# Altium footprint library Footprint-Lib-PhilsLab.PcbLib: 544 footprints (part 18 of 34)
Each footprint in its own frame and in the unit in brackets; x right, y up, seen from the top. Pads: shape width x height; smd on the part's side, far side on the other; paste and mask are expansions set on the pad; w line width, h text height; cw(c..) or ccw(c..) is an arc to the next point about the centre after c.
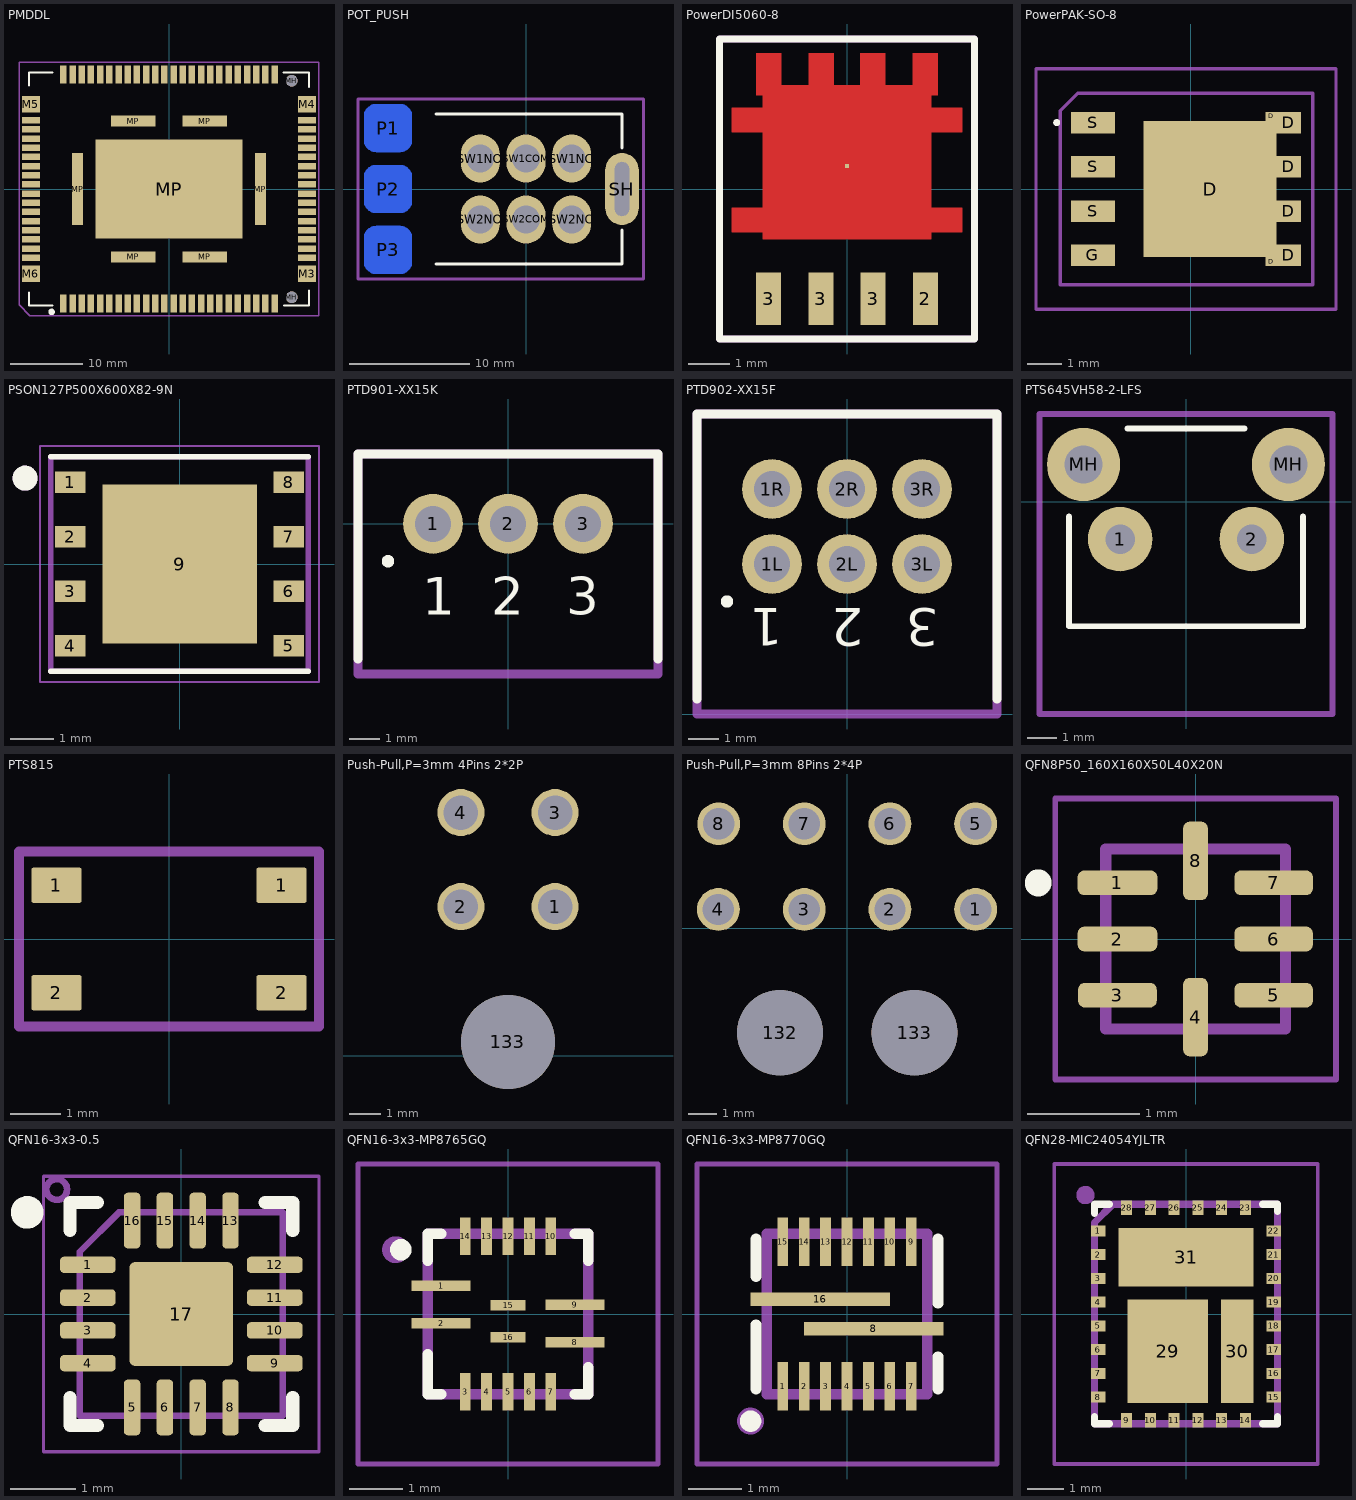
[diagram p17: the footprints below, top view; thin cyan lines are the x and y axes]

## PMDDL [mm]
pads (93):
  rect 0.9x2.5 smd: 1(-14.605,-15.85) 2(-13.335,-15.85) 3(-12.065,-15.85) 4(-10.795,-15.85) 5(-9.525,-15.85) 6(-8.255,-15.85) 7(-6.985,-15.85) 8(-5.715,-15.85) 9(-4.445,-15.85) 10(-3.175,-15.85) 11(-1.905,-15.85) 12(-0.635,-15.85) 13(0.635,-15.85) 14(1.905,-15.85) 15(3.175,-15.85) 16(4.445,-15.85) 17(5.715,-15.85) 18(6.985,-15.85) 19(8.255,-15.85) 20(9.525,-15.85) 21(10.795,-15.85) 22(12.065,-15.85) 23(13.335,-15.85) 24(14.605,-15.85) 41(14.605,15.85) 42(13.335,15.85) 43(12.065,15.85) 44(10.795,15.85) 45(9.525,15.85) 46(8.255,15.85) 47(6.985,15.85) 48(5.715,15.85) 49(4.445,15.85) 50(3.175,15.85) 51(1.905,15.85) 52(0.635,15.85) 53(-0.635,15.85) 54(-1.905,15.85) 55(-3.175,15.85) 56(-4.445,15.85) 57(-5.715,15.85) 58(-6.985,15.85) 59(-8.255,15.85) 60(-9.525,15.85) 61(-10.795,15.85) 62(-12.065,15.85) 63(-13.335,15.85) 64(-14.605,15.85)
  rect 2.5x0.9 smd: 25(19.1,-9.525) 26(19.1,-8.255) 27(19.1,-6.985) 28(19.1,-5.715) 29(19.1,-4.445) 30(19.1,-3.175) 31(19.1,-1.905) 32(19.1,-0.635) 33(19.1,0.635) 34(19.1,1.905) 35(19.1,3.175) 36(19.1,4.445) 37(19.1,5.715) 38(19.1,6.985) 39(19.1,8.255) 40(19.1,9.525) 65(-19.1,9.525) 66(-19.1,8.255) 67(-19.1,6.985) 68(-19.1,5.715) 69(-19.1,4.445) 70(-19.1,3.175) 71(-19.1,1.905) 72(-19.1,0.635) 73(-19.1,-0.635) 74(-19.1,-1.905) 75(-19.1,-3.175) 76(-19.1,-4.445) 77(-19.1,-5.715) 78(-19.1,-6.985) 79(-19.1,-8.255) 80(-19.1,-9.525)
  rect 2.5x2.3 smd: M3(19.1,-11.7) M4(19.1,11.7) M5(-19.1,11.7) M6(-19.1,-11.7)
  round 1.6 / inner round 1.4 / far side round 1.6 hole 1.6 unplated: MH(16.97,-14.985) MH(16.97,14.985)
  rect 1.5x10 smd: MP(-12.65,0) MP(12.65,0)
  rect 6.15x1.5 smd: MP(-4.975,-9.4) MP(-4.975,9.4) MP(4.975,-9.4) MP(4.975,9.4)
  rect 20.32x13.716 smd: MP(0,0)
Top Overlay:
  circle w0.5: c-16.25,-17 r0.2
  lines w0.25: -19.35,-14.31 -19.35,-16.1 -16.125,-16.1 ; -19.35,14.326 -19.35,16.1 -16.125,16.1 ; 15.805,16.1 19.355,16.1 19.355,14.07 ; 15.89,-16.1 19.35,-16.1 19.35,-14.045
Mechanical 13:
  lines w0.2: -20.75,-16 -19.25,-17.5 20.75,-17.5 20.75,17.5 -20.75,17.5 -20.75,-16
  text "'.Designator'" at -5.665,-0.417 h1
3D body "socket.stp": height 6.02, standoff -1.1, extent -19.456,-16.341 19.644,16.239
3D body "pDDL-Microhard.step": height 5.94, standoff 2.34, extent -16.406,-13.385 16.614,13.285

## POT_PUSH [mm]
pads (10):
  rrect50% 4x4 smd far side: P1(-11.5,5.08) P2(-11.5,0) P3(-11.5,-5.08)
  oval 2.8x6 hole 1.2 slot 4.5 at 90 deg: SH(8,0)
  oval 3.25x4 hole 2.3: SW1COM(0,2.54) SW1NC(3.81,2.54) SW1NO(-3.81,2.54) SW2COM(0,-2.54) SW2NC(3.81,-2.54) SW2NO(-3.81,-2.54)
Top Overlay:
  lines w0.254: -7.5,-6.25 8,-6.25 8,-3.4 ; -7.5,6.25 8,6.25 8,3.4
Mechanical 13:
  lines w0.254: -14,-7.5 9.8,-7.5 9.8,7.5 -14,7.5 -14,0.35 -14,-7.5
  text "'.Designator'" at -9.097,-0.375 h1.5
3D body "Potentiometer_push_pull.STEP": height 20.52, standoff -3.82, extent -38.199,-8.89 8.283,8.89

## PowerDI5060-8 [mm]
pads (5):
  rect 0.1x0.1 smd paste-0.1 mask-0.1: 1(0,0.56)
  rect 0.61x1.27 smd: 2(1.905,-2.66) 3(-1.905,-2.66) 3(-0.635,-2.66) 3(0.635,-2.66)
Top Layer:
  region: -2.8,-1.045 -2.05,-1.045 -2.05,-1.22 2.05,-1.22 2.05,-1.045 2.8,-1.045 2.8,-0.445 2.05,-0.445 2.05,1.38 2.8,1.38 2.8,1.98 2.05,1.98 2.05,2.28 2.2,2.28 2.2,3.305 1.6,3.305 1.6,2.53 0.925,2.53 0.925,3.305 0.325,3.305 0.325,2.53 -0.325,2.53 -0.325,3.305 -0.925,3.305 -0.925,2.53 -1.6,2.53 -1.6,3.305 -2.2,3.305 -2.2,2.28 -2.05,2.28 -2.05,1.98 -2.8,1.98 -2.8,1.38 -2.05,1.38 -2.05,-0.445 -2.8,-0.445
Top Overlay:
  lines w0.175: -3.1,-3.64 -3.1,3.65 3.1,3.65 3.1,-3.64 -3.1,-3.64
Mechanical 13:
  lines w0.175: -3.1,-3.64 -3.1,3.65 3.1,3.65 3.1,-3.64 -3.1,-3.64
  text "'.Designator'" at -4.532,-0.333 h0.8
  text "D" at -0.267,1.65 h0.8
  text "S" at -2.167,-3.025 h0.8
  text "S" at -0.892,-3.025 h0.8
  text "S" at 0.358,-3.025 h0.8
  text "G" at 1.633,-3.025 h0.8
3D body "PowerDI5060-8.stp": height 1, standoff 0.01, extent -2.575,-3.09 2.575,3.06

## PowerPAK-SO-8 [mm]
pads (11):
  rect 3.81x3.91 smd: D(0.55,0)
  rect 0.31x0.255 smd: D(2.3,-2.083) D(2.3,2.083)
  rect 0.71x0.61 smd: D(2.81,-1.905) D(2.81,-0.635) D(2.81,0.635) D(2.81,1.905)
  rect 1.27x0.61 smd: G(-2.81,-1.905) S(-2.81,-0.635) S(-2.81,0.635) S(-2.81,1.905)
Top Overlay:
  lines w0.1: -3.9,1.905 ccw(c-3.85,1.905) -3.8,1.905 ccw(c-3.85,1.905) -3.9,1.905
Mechanical 13:
  lines w0.1: -3.75,-2.75 -3.75,2.25 -3.25,2.75 3.5,2.75 3.5,-2.75 -3.75,-2.75
  text "'.Designator'" at -5.84,-0.925 h1
Mechanical 15:
  lines w0.1: -4.445,-3.45 -4.445,3.45 4.165,3.45 4.165,-3.45 -4.445,-3.45
3D body "SIR500DP-T1-RE3.stp": height 1.27, standoff 0, extent -3.384,-2.45 3.104,2.45

## PSON127P500X600X82-9N [mm]
pads (9):
  rect 0.71x0.51 smd: 1(-2.55,1.905) 2(-2.55,0.635) 3(-2.55,-0.635) 4(-2.55,-1.905) 5(2.55,-1.905) 6(2.55,-0.635) 7(2.55,0.635) 8(2.55,1.905)
  rect 3.6x3.7 smd paste-3: 9(0,0)
Top Overlay:
  circle w0.3: c-3.6,2 r0.141
  lines w0.127: -3,-2.5 3,-2.5 ; -3,2.5 3,2.5
Top Paste:
  region: 1.5,-1.45 0.18,-1.45 0.18,-0.18 1.5,-0.18
  region: -0.18,-1.45 -1.5,-1.45 -1.5,-0.18 -0.18,-0.18
  region: 1.5,0.18 0.18,0.18 0.18,1.45 1.5,1.45
  region: -0.18,0.18 -1.5,0.18 -1.5,1.45 -0.18,1.45
Mechanical 13:
  circle w0.3: c-3.6,2 r0.141
  lines w0.127: -3,-2.5 -3,2.5 3,2.5 3,-2.5 -3,-2.5
Mechanical 15:
  lines w0.05: -3.25,-2.75 -3.25,2.75 3.25,2.75 3.25,-2.75 -3.25,-2.75

## PTD901-XX15K [mm]
pads (3):
  round 2 hole 1.2 mask+0.07: 1(-2.5,0) 2(0,0) 3(2.5,0)
Top Overlay:
  circle w0.25: c-4,-1.25 r0.083
  lines w0.3: -5,-4.5 -5,2.318 5,2.318 5,-4.5
  text "3" at 1.933,-3.025 h1.25
  text "2" at -0.567,-3.025 h1.25
  text "1" at -2.858,-3.025 h1.25
Mechanical 13:
  lines w0.3: -5,-5 5,-5 5,2.318 -5,2.318 -5,-5
  text "'.Designator'" at -7.231,-2.837 h1.25
3D body "PTD901.step": height 11.32, standoff -3.49, extent -4.75,-20 4.75,2.061

## PTD902-XX15F [mm]
pads (6):
  round 2 hole 1.2 mask+0.07: 1L(-2.5,5) 1R(-2.5,7.5) 2L(0,5) 2R(0,7.5) 3L(2.5,5) 3R(2.5,7.5)
Top Overlay:
  circle w0.25: c-4,3.75 r0.083
  lines w0.3: -5,0.5 -5,10 5,10 5,0.5
  text "1" at -2.142,3.525 h1.25
  text "2" at 0.567,3.525 h1.25
  text "3" at 3.067,3.525 h1.25
Mechanical 13:
  lines w0.3: -5,0 -5,10 5,10 5,0 -5,0
  text "'.Designator'" at -7.231,-1.087 h1.25
3D body "ptd902-xx15f-xxxx.stp": height 11.36, standoff -3.49, extent -4.8,-15 4.8,9.65

## PTS645VH58-2-LFS [mm]
pads (4):
  round 2.2 hole 1: 1(-2.25,-1.275) 2(2.25,-1.275)
  round 2.5 hole 1.3: MH(-3.5,1.275) MH(3.5,1.275)
Top Overlay:
  lines w0.2: -4,-0.5 -4,-4.25 4,-4.25 4,-0.5 ; -2,2.5 2,2.5
Mechanical 13:
  lines w0.2: -5,-7.25 -5,3 0,3 5,3 5,-7.25 -4.75,-7.25 -5,-7.25
  text ".Designator" at -4.998,-0.333 h1
3D body "PTS645VH58-2LFS.stp": height 7.42, standoff -3.93, extent -4.251,-7.075 4.253,2.925

## PTS815 [mm]
pads (4):
  rrect10% 1x0.7 smd mask+0: 1(-2.25,1.075) 1(2.25,1.075) 2(-2.25,-1.075) 2(2.25,-1.075)
Mechanical 13:
  lines w0.2: -3,-1.75 3,-1.75 3,1.75 -3,1.75 -3,-1.75
  text "'.Designator'" at -5.84,-0.925 h1
3D body "PTS815SJM250SMTRLFS.stp": height 2.5, standoff 0, extent -2.25,-1.6 2.25,1.6

## Push-Pull,P=3mm 4Pins 2*2P [mm]
pads (5):
  round 1.5 hole 1.1: 1(9.17,4.76) 2(6.17,4.76) 3(9.17,7.76) 4(6.17,7.76)
  round 3 hole 3: 133(7.67,0.44)
3D body "430450402.stp": height 4.83, standoff -7.12, extent 2.87,-2.05 13.02,10.19

## Push-Pull,P=3mm 8Pins 2*4P [mm]
pads (10):
  round 1.5 hole 1.1: 1(4.505,0.66) 2(1.505,0.66) 3(-1.495,0.66) 4(-4.505,0.66) 5(4.505,3.66) 6(1.505,3.66) 7(-1.495,3.66) 8(-4.495,3.66)
  round 3 hole 3: 132(-2.345,-3.66) 133(2.365,-3.66)
3D body "430450802.stp": height 4.83, standoff -7.12, extent -7.975,-6.76 8.175,5.48

## QFN8P50_160X160X50L40X20N [mm]
pads (8):
  rrect54% 0.71x0.22 smd: 1(-0.695,0.5) 2(-0.695,0)
  rrect54% 0.7x0.22 smd: 3(-0.695,-0.5) 5(0.695,-0.5) 6(0.695,0) 7(0.695,0.5)
  rrect54% 0.22x0.7 smd: 4(0,-0.695) 8(0,0.695)
Top Overlay:
  circle w0.2: c-1.4,0.5 r0.02
Mechanical 13:
  lines w0.1: -0.8,-0.8 -0.8,0.8 0.8,0.8 0.8,-0.8 -0.8,-0.8
Mechanical 15:
  lines w0.05: -1.25,-1.25 -1.25,1.25 1.25,1.25 1.25,-1.25 -1.25,-1.25

## QFN16-3x3-0.5 [mm] "QFN, 16-Leads, Body 3.00x3.00mm, Pitch 0.50mm, Thermal Pad 1.58x1.58mm, IPC Medium Density"
height 1
pads (17):
  rrect50% 0.85x0.25 smd mask+0.05: 1(-1.425,0.75) 2(-1.425,0.25) 3(-1.425,-0.25) 4(-1.425,-0.75) 9(1.425,-0.75) 10(1.425,-0.25) 11(1.425,0.25) 12(1.425,0.75)
  rrect50% 0.25x0.85 smd mask+0.05: 5(-0.75,-1.425) 6(-0.25,-1.425) 7(0.25,-1.425) 8(0.75,-1.425) 13(0.75,1.425) 14(0.25,1.425) 15(-0.25,1.425) 16(-0.75,1.425)
  rrect10% 1.58x1.58 smd mask+0.05: 17(0,0)
Top Overlay:
  circle w0.25: c-2.35,1.55 r0.125
  lines w0.2: -1.7,-1.275 -1.7,-1.7 -1.275,-1.7 ; -1.7,1.275 -1.7,1.7 -1.275,1.7 ; 1.275,-1.7 1.7,-1.7 1.7,-1.275 ; 1.275,1.7 1.7,1.7 1.7,1.275
Mechanical 13:
  circle w0.1: c-1.9,1.9 r0.158
  lines w0.1: -1.55,-1.55 -1.55,0.95 -0.95,1.55 1.55,1.55 1.55,-1.55 -1.55,-1.55
  text "'.Designator'" at -6.315,-1.4 h1
Mechanical 15:
  lines w0.05: -2.1,-2.1 2.1,-2.1 2.1,2.1 -2.1,2.1 -2.1,-2.1
  lines w0.1: -0.5,0 0.5,0 ; 0,-0.5 0,0.5
3D body "QFN16-3x3-0.5.step": height 1, standoff 0, extent -1.551,-1.551 1.551,1.551

## QFN16-3x3-MP8765GQ [mm]
pads (16):
  rect 1.1x0.2 smd: 1(-1.25,0.525) 2(-1.25,-0.175) 8(1.25,-0.525) 9(1.25,0.175)
  rect 0.2x0.7 smd: 3(-0.8,-1.45) 4(-0.4,-1.45) 5(0,-1.45) 6(0.4,-1.45) 7(0.8,-1.45) 10(0.8,1.45) 11(0.4,1.45) 12(0,1.45) 13(-0.4,1.45) 14(-0.8,1.45)
  rect 0.65x0.2 smd: 15(0,0.165) 16(0,-0.435)
Top Overlay:
  lines w0.2: -1.5,-0.75 -1.5,-1.5 -1.25,-1.5 ; -1.5,1 -1.5,1.5 -1.25,1.5 ; 1.25,-1.5 1.5,-1.5 1.5,-1 ; 1.25,1.5 1.5,1.5 1.5,1 ; -2.1,1.2 ccw(c-2,1.2) -1.9,1.2 ccw(c-2,1.2) -2.1,1.2
Mechanical 13:
  circle w0.3: c-2.1,1.2 r0.1
  lines w0.2: -1.5,-1.5 -1.5,1.5 1.5,1.5 1.5,-1.5 -1.5,-1.5
  text "'.Designator'" at -5.815,-0.9 h1
Mechanical 15:
  lines w0.1: -2.8,-2.8 -2.8,2.8 2.8,2.8 2.8,-2.8 -2.8,-2.8
3D body "MP8765GQ-Z.stp": height 1.1, standoff 0, extent -1.5,-1.5 1.5,1.5

## QFN16-3x3-MP8770GQ [mm]
pads (16):
  rect 0.2x0.9 smd: 1(-1.2,-1.35) 2(-0.8,-1.35) 3(-0.4,-1.35) 4(0,-1.35) 5(0.4,-1.35) 6(0.8,-1.35) 7(1.2,-1.35) 9(1.2,1.35) 10(0.8,1.35) 11(0.4,1.35) 12(0,1.35) 13(-0.4,1.35) 14(-0.8,1.35) 15(-1.2,1.35)
  rect 2.6x0.25 smd: 8(0.5,-0.275) 16(-0.5,0.275)
Top Overlay:
  lines w0.2: -1.7,-1.4 -1.7,-0.2 ; -1.7,0.7 -1.7,1.4 ; 1.7,-1.4 1.7,-0.8 ; 1.7,0.2 1.7,1.4 ; -1.9,-2 ccw(c-1.8,-2) -1.7,-2 ccw(c-1.8,-2) -1.9,-2
Mechanical 13:
  circle w0.3: c-1.801,-1.998 r0.1
  lines w0.2: -1.5,-1.5 -1.5,1.5 1.5,1.5 1.5,-1.5 -1.5,-1.5
  text "'.Designator'" at -5.815,-0.9 h1
Mechanical 15:
  lines w0.1: -2.8,-2.8 -2.8,2.8 2.8,2.8 2.8,-2.8 -2.8,-2.8
3D body "MP8770CGQ.step": height 0.86, standoff 0.01, extent -1.5,-1.5 1.5,1.5

## QFN28-MIC24054YJLTR [mm]
pads (31):
  rect 0.4x0.3 smd: 1(-2.4,2.275) 2(-2.4,1.625) 3(-2.4,0.975) 4(-2.4,0.325) 5(-2.4,-0.325) 6(-2.4,-0.975) 7(-2.4,-1.625) 8(-2.4,-2.275) 15(2.4,-2.275) 16(2.4,-1.625) 17(2.4,-0.975) 18(2.4,-0.325) 19(2.4,0.325) 20(2.4,0.975) 21(2.4,1.625) 22(2.4,2.275)
  rect 0.3x0.4 smd: 9(-1.625,-2.9) 10(-0.975,-2.9) 11(-0.325,-2.9) 12(0.325,-2.9) 13(0.975,-2.9) 14(1.625,-2.9) 23(1.625,2.9) 24(0.975,2.9) 25(0.325,2.9) 26(-0.325,2.9) 27(-0.975,2.9) 28(-1.625,2.9)
  rect 2.2x2.83 smd: 29(-0.5,-1.015)
  rect 0.9x2.83 smd: 30(1.4,-1.015)
  rect 3.7x1.6 smd: 31(0,1.55)
Top Overlay:
  lines w0.2: -2.5,-2.8 -2.5,-3 -2.1,-3 ; -2.5,2.75 -2.5,3 -2.1,3 ; 2.1,-3 2.5,-3 2.5,-2.8 ; 2.1,3 2.5,3 2.5,2.8
Mechanical 13:
  circle w0.3: c-2.75,3.25 r0.1
  lines w0.2: -2.5,-3 -2.5,2.5 -2,3 2.5,3 2.5,-3 -2.5,-3
  text "'.Designator'" at -5.815,-0.9 h1
Mechanical 15:
  lines w0.1: -3.6,-4.1 3.6,-4.1 3.6,4.1 -3.6,4.1 -3.6,-4.1
3D body "MIC24054YJL-TR.stp": height 1, standoff 0, extent -2.5,-3 2.5,3